# Altium footprint library Miscellaneous Connectors.PcbLib: 245 footprints (part 12 of 16)
Each footprint in its own frame and in the unit in brackets; x right, y up, seen from the top. Pads: shape width x height; smd on the part's side, far side on the other; paste and mask are expansions set on the pad; w line width, h text height; cw(c..) or ccw(c..) is an arc to the next point about the centre after c.
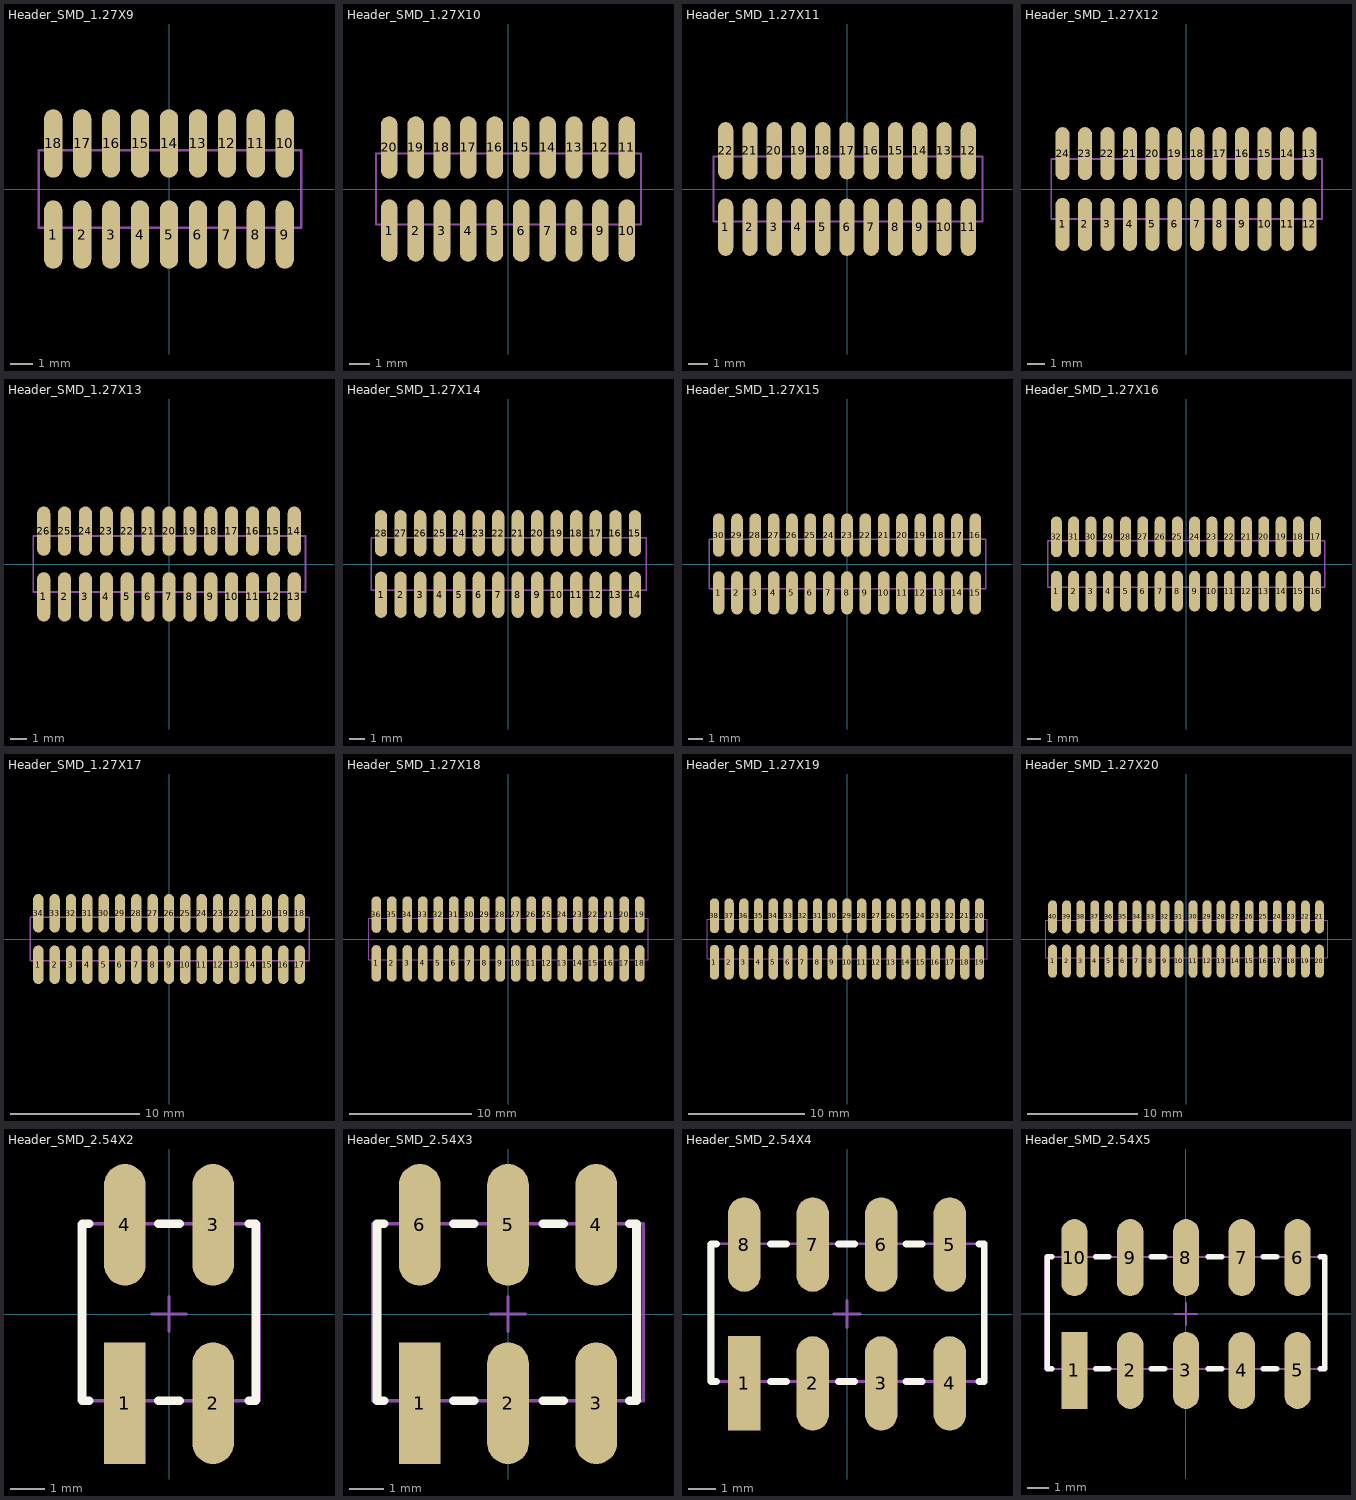
[diagram p11: the footprints below, top view; thin cyan lines are the x and y axes]

## Header_SMD_1.27X9 [mm]
pads (18):
  oval 0.8x3 smd: 1(-5.08,-2) 2(-3.81,-2) 3(-2.54,-2) 4(-1.27,-2) 5(0,-2) 6(1.27,-2) 7(2.54,-2) 8(3.81,-2) 9(5.08,-2) 10(5.08,2) 11(3.81,2) 12(2.54,2) 13(1.27,2) 14(0,2) 15(-1.27,2) 16(-2.54,2) 17(-3.81,2) 18(-5.08,2)
Mechanical 15:
  lines w0.1: -5.715,-1.7 -5.715,1.7 5.8,1.7 5.8,-1.7 -5.715,-1.7
3D body: height 6.4, standoff 0, extent -5.685,-2.752 5.745,2.752

## Header_SMD_1.27X10 [mm]
pads (20):
  oval 0.8x3 smd: 1(-5.715,-2) 2(-4.445,-2) 3(-3.175,-2) 4(-1.905,-2) 5(-0.635,-2) 6(0.635,-2) 7(1.905,-2) 8(3.175,-2) 9(4.445,-2) 10(5.715,-2) 11(5.715,2) 12(4.445,2) 13(3.175,2) 14(1.905,2) 15(0.635,2) 16(-0.635,2) 17(-1.905,2) 18(-3.175,2) 19(-4.445,2) 20(-5.715,2)
Mechanical 15:
  lines w0.1: -6.35,-1.7 6.4,-1.7 6.4,1.7 -6.35,1.7 -6.35,-1.7
3D body: height 6.4, standoff 0, extent -6.32,-2.752 6.38,2.752

## Header_SMD_1.27X11 [mm]
pads (22):
  oval 0.8x3 smd: 1(-6.35,-2) 2(-5.08,-2) 3(-3.81,-2) 4(-2.54,-2) 5(-1.27,-2) 6(0,-2) 7(1.27,-2) 8(2.54,-2) 9(3.81,-2) 10(5.08,-2) 11(6.35,-2) 12(6.35,2) 13(5.08,2) 14(3.81,2) 15(2.54,2) 16(1.27,2) 17(0,2) 18(-1.27,2) 19(-2.54,2) 20(-3.81,2) 21(-5.08,2) 22(-6.35,2)
Mechanical 15:
  lines w0.1: -6.985,-1.7 -6.985,1.7 7.1,1.7 7.1,-1.7 -6.985,-1.7
3D body: height 6.4, standoff 0, extent -6.955,-2.752 7.015,2.752

## Header_SMD_1.27X12 [mm]
pads (24):
  oval 0.8x3 smd: 1(-6.985,-2) 2(-5.715,-2) 3(-4.445,-2) 4(-3.175,-2) 5(-1.905,-2) 6(-0.635,-2) 7(0.635,-2) 8(1.905,-2) 9(3.175,-2) 10(4.445,-2) 11(5.715,-2) 12(6.985,-2) 13(6.985,2) 14(5.715,2) 15(4.445,2) 16(3.175,2) 17(1.905,2) 18(0.635,2) 19(-0.635,2) 20(-1.905,2) 21(-3.175,2) 22(-4.445,2) 23(-5.715,2) 24(-6.985,2)
Mechanical 15:
  lines w0.1: -7.62,-1.7 -7.62,1.7 7.7,1.7 7.7,-1.7 -7.62,-1.7
3D body: height 6.4, standoff 0, extent -7.59,-2.752 7.65,2.752

## Header_SMD_1.27X13 [mm]
pads (26):
  oval 0.8x3 smd: 1(-7.62,-2) 2(-6.35,-2) 3(-5.08,-2) 4(-3.81,-2) 5(-2.54,-2) 6(-1.27,-2) 7(0,-2) 8(1.27,-2) 9(2.54,-2) 10(3.81,-2) 11(5.08,-2) 12(6.35,-2) 13(7.62,-2) 14(7.62,2) 15(6.35,2) 16(5.08,2) 17(3.81,2) 18(2.54,2) 19(1.27,2) 20(0,2) 21(-1.27,2) 22(-2.54,2) 23(-3.81,2) 24(-5.08,2) 25(-6.35,2) 26(-7.62,2)
Mechanical 15:
  lines w0.1: -8.255,-1.7 8.3,-1.7 8.3,1.7 -8.255,1.7 -8.255,-1.7
3D body: height 6.4, standoff 0, extent -8.225,-2.752 8.285,2.752

## Header_SMD_1.27X14 [mm]
pads (28):
  oval 0.8x3 smd: 1(-8.255,-2) 2(-6.985,-2) 3(-5.715,-2) 4(-4.445,-2) 5(-3.175,-2) 6(-1.905,-2) 7(-0.635,-2) 8(0.635,-2) 9(1.905,-2) 10(3.175,-2) 11(4.445,-2) 12(5.715,-2) 13(6.985,-2) 14(8.255,-2) 15(8.255,2) 16(6.985,2) 17(5.715,2) 18(4.445,2) 19(3.175,2) 20(1.905,2) 21(0.635,2) 22(-0.635,2) 23(-1.905,2) 24(-3.175,2) 25(-4.445,2) 26(-5.715,2) 27(-6.985,2) 28(-8.255,2)
Mechanical 15:
  lines w0.1: -8.89,-1.7 9,-1.7 9,1.7 -8.89,1.7 -8.89,-1.7
3D body: height 6.4, standoff 0, extent -8.86,-2.752 8.92,2.752

## Header_SMD_1.27X15 [mm]
pads (30):
  oval 0.8x3 smd: 1(-8.89,-2) 2(-7.62,-2) 3(-6.35,-2) 4(-5.08,-2) 5(-3.81,-2) 6(-2.54,-2) 7(-1.27,-2) 8(0,-2) 9(1.27,-2) 10(2.54,-2) 11(3.81,-2) 12(5.08,-2) 13(6.35,-2) 14(7.62,-2) 15(8.89,-2) 16(8.89,2) 17(7.62,2) 18(6.35,2) 19(5.08,2) 20(3.81,2) 21(2.54,2) 22(1.27,2) 23(0,2) 24(-1.27,2) 25(-2.54,2) 26(-3.81,2) 27(-5.08,2) 28(-6.35,2) 29(-7.62,2) 30(-8.89,2)
Mechanical 15:
  lines w0.1: -9.525,-1.7 -9.525,1.7 9.6,1.7 9.6,-1.7 -9.525,-1.7
3D body: height 6.4, standoff 0, extent -9.495,-2.752 9.555,2.752

## Header_SMD_1.27X16 [mm]
pads (32):
  oval 0.8x3 smd: 1(-9.525,-2) 2(-8.255,-2) 3(-6.985,-2) 4(-5.715,-2) 5(-4.445,-2) 6(-3.175,-2) 7(-1.905,-2) 8(-0.635,-2) 9(0.635,-2) 10(1.905,-2) 11(3.175,-2) 12(4.445,-2) 13(5.715,-2) 14(6.985,-2) 15(8.255,-2) 16(9.525,-2) 17(9.525,2) 18(8.255,2) 19(6.985,2) 20(5.715,2) 21(4.445,2) 22(3.175,2) 23(1.905,2) 24(0.635,2) 25(-0.635,2) 26(-1.905,2) 27(-3.175,2) 28(-4.445,2) 29(-5.715,2) 30(-6.985,2) 31(-8.255,2) 32(-9.525,2)
Mechanical 15:
  lines w0.1: -10.16,-1.7 -10.16,1.7 10.2,1.7 10.2,-1.7 -10.16,-1.7
3D body: height 6.4, standoff 0, extent -10.13,-2.752 10.19,2.752

## Header_SMD_1.27X17 [mm]
pads (34):
  oval 0.8x3 smd: 1(-10.16,-2) 2(-8.89,-2) 3(-7.62,-2) 4(-6.35,-2) 5(-5.08,-2) 6(-3.81,-2) 7(-2.54,-2) 8(-1.27,-2) 9(0,-2) 10(1.27,-2) 11(2.54,-2) 12(3.81,-2) 13(5.08,-2) 14(6.35,-2) 15(7.62,-2) 16(8.89,-2) 17(10.16,-2) 18(10.16,2) 19(8.89,2) 20(7.62,2) 21(6.35,2) 22(5.08,2) 23(3.81,2) 24(2.54,2) 25(1.27,2) 26(0,2) 27(-1.27,2) 28(-2.54,2) 29(-3.81,2) 30(-5.08,2) 31(-6.35,2) 32(-7.62,2) 33(-8.89,2) 34(-10.16,2)
Mechanical 15:
  lines w0.1: -10.795,-1.7 -10.795,1.7 10.9,1.7 10.9,-1.7 -10.795,-1.7
3D body: height 6.4, standoff 0, extent -10.765,-2.752 10.825,2.752

## Header_SMD_1.27X18 [mm]
pads (36):
  oval 0.8x3 smd: 1(-10.795,-2) 2(-9.525,-2) 3(-8.255,-2) 4(-6.985,-2) 5(-5.715,-2) 6(-4.445,-2) 7(-3.175,-2) 8(-1.905,-2) 9(-0.635,-2) 10(0.635,-2) 11(1.905,-2) 12(3.175,-2) 13(4.445,-2) 14(5.715,-2) 15(6.985,-2) 16(8.255,-2) 17(9.525,-2) 18(10.795,-2) 19(10.795,2) 20(9.525,2) 21(8.255,2) 22(6.985,2) 23(5.715,2) 24(4.445,2) 25(3.175,2) 26(1.905,2) 27(0.635,2) 28(-0.635,2) 29(-1.905,2) 30(-3.175,2) 31(-4.445,2) 32(-5.715,2) 33(-6.985,2) 34(-8.255,2) 35(-9.525,2) 36(-10.795,2)
Mechanical 15:
  lines w0.1: -11.43,-1.7 -11.43,1.7 11.5,1.7 11.5,-1.7 -11.43,-1.7
3D body: height 6.4, standoff 0, extent -11.4,-2.752 11.46,2.752

## Header_SMD_1.27X19 [mm]
pads (38):
  oval 0.8x3 smd: 1(-11.43,-2) 2(-10.16,-2) 3(-8.89,-2) 4(-7.62,-2) 5(-6.35,-2) 6(-5.08,-2) 7(-3.81,-2) 8(-2.54,-2) 9(-1.27,-2) 10(0,-2) 11(1.27,-2) 12(2.54,-2) 13(3.81,-2) 14(5.08,-2) 15(6.35,-2) 16(7.62,-2) 17(8.89,-2) 18(10.16,-2) 19(11.43,-2) 20(11.43,2) 21(10.16,2) 22(8.89,2) 23(7.62,2) 24(6.35,2) 25(5.08,2) 26(3.81,2) 27(2.54,2) 28(1.27,2) 29(0,2) 30(-1.27,2) 31(-2.54,2) 32(-3.81,2) 33(-5.08,2) 34(-6.35,2) 35(-7.62,2) 36(-8.89,2) 37(-10.16,2) 38(-11.43,2)
Mechanical 15:
  lines w0.1: -12.065,-1.7 12.1,-1.7 12.1,1.7 -12.065,1.7 -12.065,-1.7
3D body: height 6.4, standoff 0, extent -12.035,-2.752 12.095,2.752

## Header_SMD_1.27X20 [mm]
pads (40):
  oval 0.8x3 smd: 1(-12.065,-2) 2(-10.795,-2) 3(-9.525,-2) 4(-8.255,-2) 5(-6.985,-2) 6(-5.715,-2) 7(-4.445,-2) 8(-3.175,-2) 9(-1.905,-2) 10(-0.635,-2) 11(0.635,-2) 12(1.905,-2) 13(3.175,-2) 14(4.445,-2) 15(5.715,-2) 16(6.985,-2) 17(8.255,-2) 18(9.525,-2) 19(10.795,-2) 20(12.065,-2) 21(12.065,2) 22(10.795,2) 23(9.525,2) 24(8.255,2) 25(6.985,2) 26(5.715,2) 27(4.445,2) 28(3.175,2) 29(1.905,2) 30(0.635,2) 31(-0.635,2) 32(-1.905,2) 33(-3.175,2) 34(-4.445,2) 35(-5.715,2) 36(-6.985,2) 37(-8.255,2) 38(-9.525,2) 39(-10.795,2) 40(-12.065,2)
Mechanical 15:
  lines w0.1: -12.7,-1.7 -12.7,1.7 12.8,1.7 12.8,-1.7 -12.7,-1.7
3D body: height 6.4, standoff 0, extent -12.67,-2.752 12.73,2.752

## Header_SMD_2.54X2 [mm]
pads (4):
  rect 1.2x3.5 smd: 1(-1.27,-2.57)
  oval 1.2x3.5 smd: 2(1.27,-2.57) 3(1.27,2.57) 4(-1.27,2.57)
Top Overlay:
  lines w0.254: -2.3,-2.5 -2.5,-2.5 ; -2.3,2.6 -2.5,2.6 ; -0.3,-2.5 0.3,-2.5 ; -0.3,2.6 0.3,2.6 ; 2.3,-2.5 2.5,-2.5 ; 2.3,2.6 2.5,2.6 ; -2.5,-2.5 -2.5,-2.5 ; -2.5,-2.5 -2.5,2.6 ; -2.5,2.6 -2.5,2.6 ; 2.5,-2.5 2.5,-2.5 ; 2.5,-2.5 2.5,2.6 ; 2.5,2.6 2.5,2.6
Mechanical 15:
  lines w0.1: -0.5,0 0.5,0 ; 0,-0.5 0,0.5 ; -2.6,-2.5 -2.6,2.6 2.6,2.6 2.6,-2.5 -2.6,-2.5
3D body: height 9.7, standoff -0.04, extent -2.58,-3.75 2.5,3.75

## Header_SMD_2.54X3 [mm]
pads (6):
  rect 1.2x3.5 smd: 1(-2.54,-2.57)
  oval 1.2x3.5 smd: 2(0,-2.57) 3(2.54,-2.57) 4(2.54,2.57) 5(0,2.57) 6(-2.54,2.57)
Top Overlay:
  lines w0.254: -3.57,-2.5 -3.77,-2.5 ; -3.57,2.6 -3.77,2.6 ; -1.57,-2.5 -0.97,-2.5 ; -1.57,2.6 -0.97,2.6 ; 1,-2.5 1.6,-2.5 ; 1,2.6 1.6,2.6 ; 3.5,-2.5 3.7,-2.5 3.7,2.6 3.5,2.6 ; -3.77,-2.5 -3.77,-2.5 ; -3.77,-2.5 -3.77,2.6 ; -3.77,2.6 -3.77,2.6
Mechanical 15:
  lines w0.1: -0.5,0 0.5,0 ; 0,-0.5 0,0.5 ; -3.9,-2.5 -3.9,2.6 3.9,2.6 3.9,-2.5 -3.9,-2.5
3D body: height 9.7, standoff -0.04, extent -3.85,-3.75 3.77,3.75

## Header_SMD_2.54X4 [mm]
pads (8):
  rect 1.2x3.5 smd: 1(-3.81,-2.57)
  oval 1.2x3.5 smd: 2(-1.27,-2.57) 3(1.27,-2.57) 4(3.81,-2.57) 5(3.81,2.57) 6(1.27,2.57) 7(-1.27,2.57) 8(-3.81,2.57)
Top Overlay:
  lines w0.254: -4.84,-2.5 -5.04,-2.5 ; -4.84,2.6 -5.04,2.6 ; -2.84,-2.5 -2.24,-2.5 ; -2.84,2.6 -2.24,2.6 ; -0.31,-2.5 0.29,-2.5 ; -0.31,2.6 0.29,2.6 ; 2.19,-2.5 2.79,-2.5 ; 2.19,2.6 2.79,2.6 ; 4.89,-2.5 5.09,-2.5 5.09,2.6 4.89,2.6 ; -5.04,-2.5 -5.04,2.6 ; -5.04,-2.5 -5.04,-2.5 ; -5.04,2.6 -5.04,2.6
Mechanical 15:
  lines w0.1: -0.5,0 0.5,0 ; 0,-0.5 0,0.5 ; -5.14,-2.5 5.09,-2.5 5.09,2.6 -5.14,2.6 -5.14,-2.5
3D body: height 9.7, standoff -0.04, extent -5.12,-3.75 5.04,3.75

## Header_SMD_2.54X5 [mm]
pads (10):
  rect 1.2x3.5 smd: 1(-5.08,-2.57)
  oval 1.2x3.5 smd: 2(-2.54,-2.57) 3(0,-2.57) 4(2.54,-2.57) 5(5.08,-2.57) 6(5.08,2.57) 7(2.54,2.57) 8(0,2.57) 9(-2.54,2.57) 10(-5.08,2.57)
Top Overlay:
  lines w0.254: -6.11,-2.5 -6.31,-2.5 ; -6.11,2.6 -6.31,2.6 ; -4.11,-2.5 -3.51,-2.5 ; -4.11,2.6 -3.51,2.6 ; -1.58,-2.5 -0.98,-2.5 ; -1.58,2.6 -0.98,2.6 ; 1.02,-2.5 1.62,-2.5 ; 1.02,2.6 1.62,2.6 ; 3.52,-2.5 4.12,-2.5 ; 3.52,2.6 4.12,2.6 ; 6.12,-2.5 6.32,-2.5 6.32,2.6 6.12,2.6 ; -6.31,-2.5 -6.31,2.6 ; -6.31,-2.5 -6.31,-2.5 ; -6.31,2.6 -6.31,2.6
Mechanical 15:
  lines w0.1: -0.51,0 0.5,0 ; 0,-0.5 0,0.5 ; -6.41,-2.5 6.32,-2.5 6.32,2.6 -6.41,2.6 -6.41,-2.5
3D body: height 9.7, standoff -0.04, extent -6.39,-3.75 6.31,3.75